# Altium footprint library STPMotorControl_1.PcbLib: 84 footprints (part 3 of 6)
Each footprint in its own frame and in the unit in brackets; x right, y up, seen from the top. Pads: shape width x height; smd on the part's side, far side on the other; paste and mask are expansions set on the pad; w line width, h text height; cw(c..) or ccw(c..) is an arc to the next point about the centre after c.
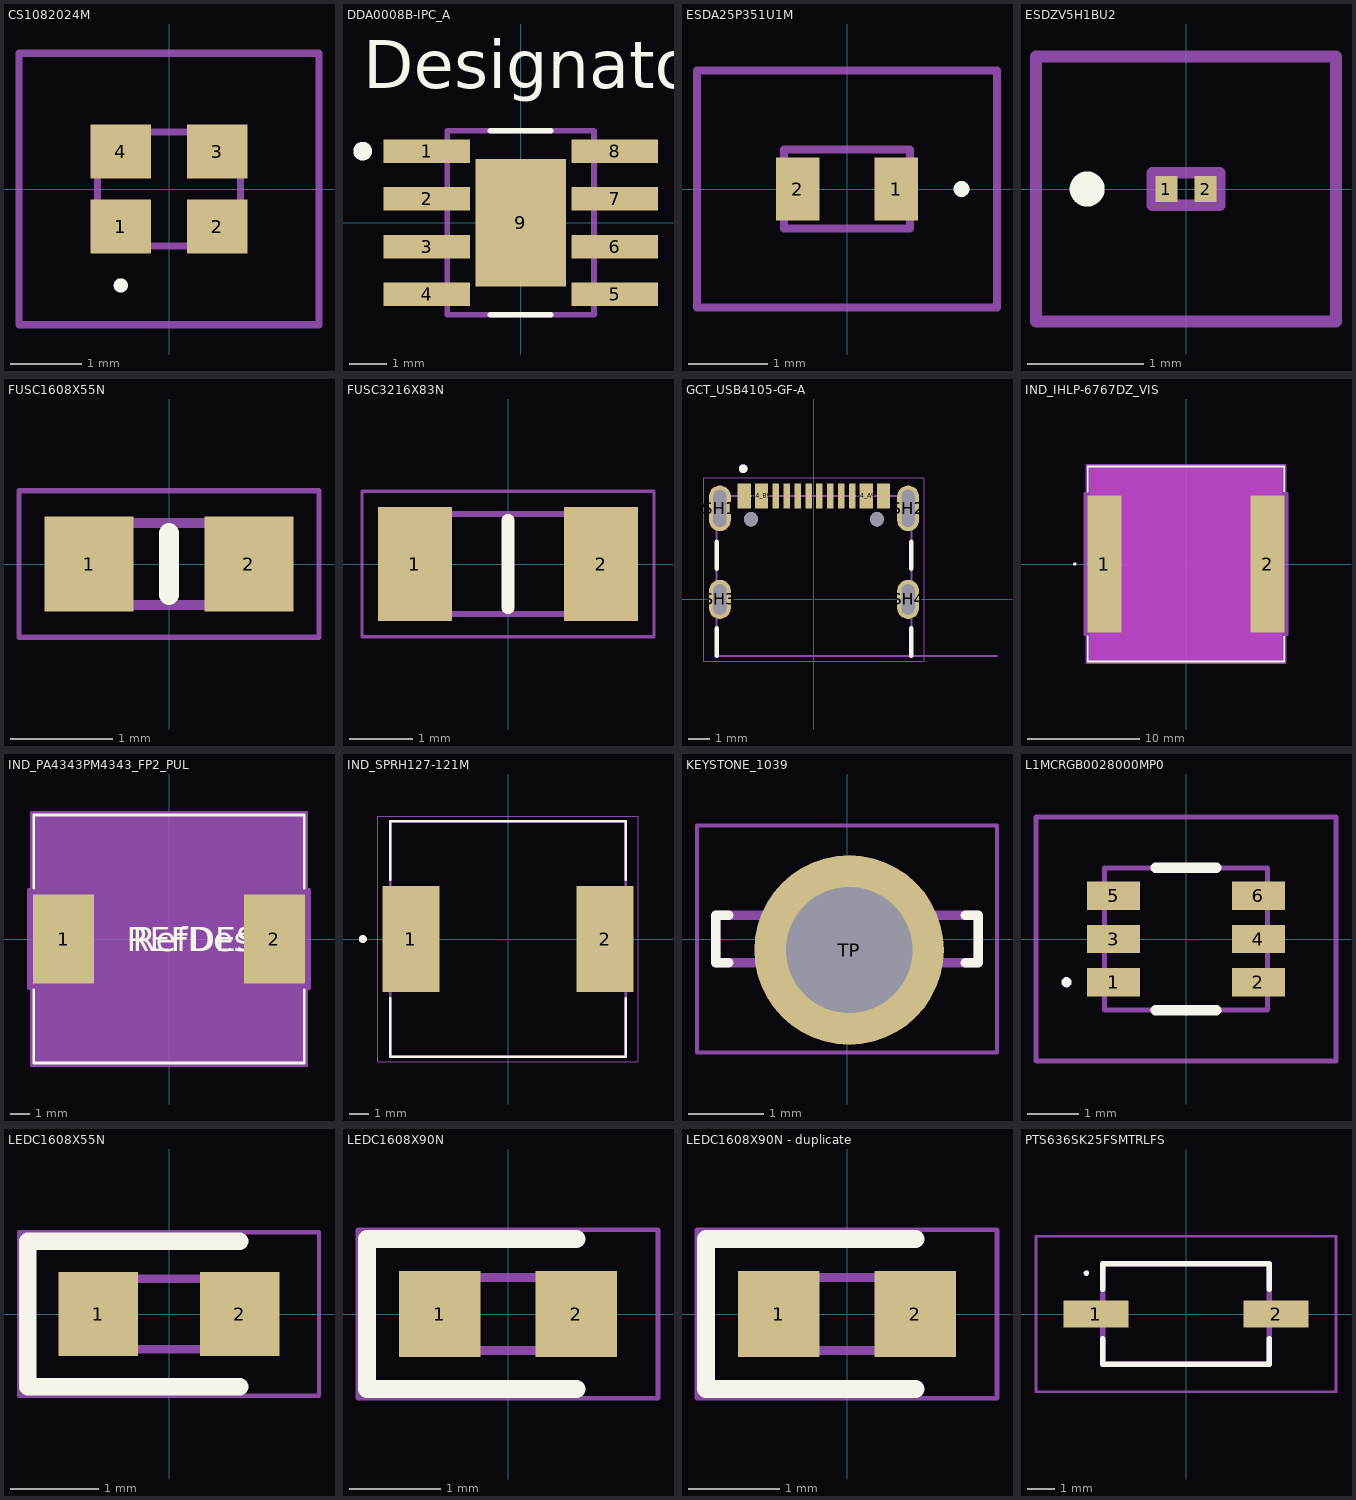
[diagram p2: the footprints below, top view; thin cyan lines are the x and y axes]

## CS1082024M [mm]
pads (4):
  rect 0.85x0.75 smd: 1(-0.675,-0.525) 2(0.675,-0.525) 3(0.675,0.525) 4(-0.675,0.525)
Top Overlay:
  lines w0.1: -0.675,-1.4 cw(c-0.675,-1.35) -0.675,-1.3 cw(c-0.675,-1.35) -0.675,-1.4
Mechanical 15:
  lines w0.1: -1,-0.8 -1,0.8 1,0.8 1,-0.8 -1,-0.8
Mechanical 20:
  lines w0.1: -2.1,-1.9 -2.1,1.9 2.1,1.9 2.1,-1.9 -2.1,-1.9
3D body "CS10820-24M.stp": height 0.6, standoff 0, extent -1.015,-0.818 1.035,0.832

## DDA0008B-IPC_A [mm]
pads (9):
  rect 2.298x0.622 smd paste+0 mask+0: 1(-2.504,1.905) 2(-2.504,0.635) 3(-2.504,-0.635) 4(-2.504,-1.905) 5(2.504,-1.905) 6(2.504,-0.635) 7(2.504,0.635) 8(2.504,1.905)
  rect 2.41x3.4 smd paste-1.687 mask+0: 9(0,0)
Top Overlay:
  circle w0.25: c-4.203,1.905 r0.125
  lines w0.15: -0.804,-2.45 0.804,-2.45 ; -0.804,2.45 0.804,2.45
  text "Designator857" at -4.191,3.581 h1.27
  text ".Designator" at -5.274,3.572 h1.27
Top Paste:
  region: -0.691,1.186 -0.691,-1.186 0.691,-1.186 0.691,1.186
Mechanical 13:
  lines w0.15: -1.95,-2.45 -1.95,2.45 1.95,2.45 1.95,-2.45 -1.95,-2.45
  text ".Designator" at -5.265,3.572 h1.27

## ESDA25P351U1M [mm]
pads (2):
  rect 0.55x0.8 smd: 1(0.625,0) 2(-0.625,0)
Top Overlay:
  lines w0.1: 1.4,0 ccw(c1.45,0) 1.5,0 ccw(c1.45,0) 1.4,0
Mechanical 13:
  lines w0.1: -0.8,-0.5 -0.8,0.5 0.8,0.5 0.8,-0.5 -0.8,-0.5
Mechanical 15:
  lines w0.1: -1.9,-1.5 1.9,-1.5 1.9,1.5 -1.9,1.5 -1.9,-1.5
3D body "ESDA25P35-1U1M.stp": height 0.57, standoff 0, extent -0.8,-0.5 0.8,0.5

## ESDZV5H1BU2 [mm]
pads (2):
  rect 0.187x0.225 smd: 1(-0.168,0) 2(0.168,0)
Top Overlay:
  lines w0.2: -0.9,0 ccw(c-0.85,0) -0.8,0 ; -0.9,0 cw(c-0.85,0) -0.8,0 ; -0.9,0 ccw(c-0.85,0) -0.8,0
Mechanical 15:
  lines w0.1: -0.29,-0.14 0.29,-0.14 0.29,0.14 -0.29,0.14 -0.29,-0.14
Mechanical 20:
  lines w0.1: -1.29,-1.14 1.29,-1.14 1.29,1.14 -1.29,1.14 -1.29,-1.14
3D body "ESDZV5H-1BU2.stp": height 0.37, standoff 0, extent -0.289,-0.139 0.291,0.141

## FUSC1608X55N [mm]
pads (2):
  rect 0.87x0.93 smd: 1(-0.78,0) 2(0.78,0)
Top Overlay:
  lines w0.2: 0,-0.3 0,0.3
Mechanical 15:
  lines w0.1: -0.8,-0.4 0.8,-0.4 0.8,0.4 -0.8,0.4 -0.8,-0.4
Mechanical 20:
  lines w0.05: -1.465,-0.715 1.465,-0.715 1.465,0.715 -1.465,0.715 -1.465,-0.715
3D body "SF-0603S080-2.stp": height 0.55, standoff 0, extent -0.79,-0.388 0.81,0.412

## FUSC3216X83N [mm]
pads (2):
  rect 1.17x1.8 smd: 1(-1.47,0) 2(1.47,0)
Top Overlay:
  lines w0.2: 0,-0.69 0,0.69
Mechanical 13:
  lines w0.1: -1.6,-0.79 -1.6,0.79 1.6,0.79 1.6,-0.79 -1.6,-0.79
Mechanical 15:
  lines w0.05: -2.305,-1.15 -2.305,1.15 2.305,1.15 2.305,-1.15 -2.305,-1.15
3D body "0685T1000-01.stp": height 0.83, standoff 0, extent -1.6,-0.79 1.6,0.79

## GCT_USB4105-GF-A [mm]
height 3.31
pads (18):
  rect 0.6x1.15 smd mask+0.05: A1_B12(-3.2,4.755) A4_B9(-2.4,4.755) B1_A12(3.2,4.755) B4_A9(2.4,4.755)
  rect 0.3x1.15 smd mask+0.05: A5(-1.25,4.755) A6(-0.25,4.755) A7(0.25,4.755) A8(1.25,4.755) B5(1.75,4.755) B6(0.75,4.755) B7(-0.75,4.755) B8(-1.75,4.755)
  oval 1x2.1 hole 0.6 slot 1.7 at 90 deg: SH1(-4.32,4.18) SH2(4.32,4.18)
  oval 1x1.8 hole 0.6 slot 1.4 at 90 deg: SH3(-4.32,0) SH4(4.32,0)
  round 0.65 hole 0.65 unplated: ""(-2.89,3.68) ""(2.89,3.68)
Top Overlay:
  circle w0.2: c-3.25,6 r0.1
  lines w0.2: -4.47,-2.6 -4.47,-1.32 ; -4.47,1.4 -4.47,2.65 ; 4.47,-2.6 4.47,-1.32 ; 4.47,1.4 4.47,2.65
Mechanical 13:
  circle w0.2: c-3.25,6 r0.1
  lines w0.1: 8.4,-2.6 4.47,-2.6 ; 4.47,-2.6 4.47,4.75 -4.47,4.75 -4.47,-2.6 4.47,-2.6
  text "PCB EDGE" at 5.4,-2.5 h0.41
Mechanical 15:
  lines w0.05: -5.07,-2.85 -5.07,5.58 5.07,5.58 5.07,-2.85 -5.07,-2.85

## IND_IHLP-6767DZ_VIS [mil]
pads (2):
  rect 119x480 smd paste+0 mask+0: 1(-286.5,0) 2(286.5,0)
Top Layer keep-out:
  region: -225,-242 -225,242 225,242 225,-242
  region: -338,242 -338,335.5 338,335.5 338,242
  region: -338,-335.5 -338,-242 338,-242 338,-335.5
Top Overlay:
  circle w6: c-390,0 r3
  lines w6: -345,-253.1 -345,-342.5 345,-342.5 345,-253.1 ; -345,253.1 -345,342.5 345,342.5 345,253.1
  text ".Designator" at -137.5,-25 h50
Keep-Out Layer:
  region: -225,-242 -225,242 225,242 225,-242
Mechanical 13:
  circle w1: c-320,0 r3
  lines w1: -340,-337.5 340,-337.5 340,337.5 -340,337.5 -340,-337.5
  text ".Designator" at -137.5,-25 h50
Mechanical 15:
  region: -350,-250 -356,-250 -356,250 -350,250 -350,347.5 350,347.5 350,250 356,250 356,-250 350,-250 350,-347.5 -350,-347.5
  lines w6: -356,-250 -356,250 -350,250 -350,347.5 350,347.5 350,250 356,250 356,-250 350,-250 350,-347.5 -350,-347.5 -350,-250 -356,-250
3D body "IND_IHLP-6767DZ_VIS.step": height 160, standoff 0, extent -340,-337.48 340,337.48

## IND_PA4343PM4343_FP2_PUL [mil]
pads (2):
  rect 126x185 smd paste+0 mask+0: 1(-218.5,0) 2(218.5,0)
Top Overlay:
  lines w6: -280.5,-105.6 -280.5,-257 280.5,-257 280.5,-105.6 ; -280.5,105.6 -280.5,257 280.5,257 280.5,105.6
  text "REFDES" at -87.5,-25 h50
  text "RefDes" at -75,-25 h50
Mechanical 13:
  lines w1: -275.5,-126 -149.5,-252 ; -275.5,126 -149.5,252 ; -275.5,-252 -275.5,252 275.5,252 275.5,-252 -275.5,-252
  text "RefDes2" at -87.5,-25 h50
Mechanical 15:
  region: 275.5,-252 -275.5,-252 -275.5,252 275.5,252
  region: -285.5,-102.5 -291.5,-102.5 -291.5,102.5 -285.5,102.5 -285.5,262 285.5,262 285.5,102.5 291.5,102.5 291.5,-102.5 285.5,-102.5 285.5,-262 -285.5,-262
  lines w6: -291.5,-102.5 -285.5,-102.5 -285.5,-262 285.5,-262 285.5,-102.5 291.5,-102.5 291.5,102.5 285.5,102.5 285.5,262 -285.5,262 -285.5,102.5 -291.5,102.5 -291.5,-102.5
3D body "IND_PA4343PM4343_FP2_PUL.step": height 255.98, standoff 0, extent -275.51,-252.01 275.51,252.01

## IND_SPRH127-121M [mm]
height 8.05
pads (2):
  rect 2.9x5.4 smd paste+0 mask+0.102: 1(-4.95,0) 2(4.95,0)
Top Overlay:
  circle w0.2: c-7.4,0 r0.1
  lines w0.127: -6,-3.02 -6,-6 6,-6 6,-3.02 ; -6,3.02 -6,6 6,6 6,3.02
Mechanical 13:
  circle w0.2: c-7.4,0 r0.1
  lines w0.127: -6,-6 6,-6 6,6 -6,6 -6,-6
Mechanical 15:
  lines w0.05: -6.65,-6.25 6.65,-6.25 6.65,6.25 -6.65,6.25 -6.65,-6.25
3D body "IND_PA4343PM4343_FP2_PUL.step": height 6.5, standoff 0, extent -7.121,-6.278 6.875,6.524

## KEYSTONE_1039 [mm]
height 5.94
pads (1):
  round 2.535 hole 1.69 mask+0.102: TP(0.028,-0.147)
Top Overlay:
  lines w0.127: -1.581,-0.315 -1.755,-0.315 -1.755,0.315 -1.581,0.315 ; 1.581,-0.315 1.755,-0.315 1.755,0.315 1.581,0.315
Mechanical 13:
  lines w0.127: -1.755,-0.315 -1.755,0.315 1.755,0.315 1.755,-0.315 -1.755,-0.315
Mechanical 15:
  lines w0.05: -2.005,-1.518 -2.005,1.518 2.005,1.518 2.005,-1.518 -2.005,-1.518
3D body "step_temp.STEP": height 6.96, standoff -3.05, extent -1.753,-0.422 1.753,0.213

## L1MCRGB0028000MP0 [mm]
pads (6):
  rect 1.05x0.56 smd: 1(-1.425,-0.85) 2(1.425,-0.85) 3(-1.425,0) 4(1.425,0) 5(-1.425,0.85) 6(1.425,0.85)
Top Overlay:
  lines w0.1: -2.4,-0.85 ccw(c-2.35,-0.85) -2.3,-0.85 ccw(c-2.35,-0.85) -2.4,-0.85
  lines w0.2: -0.6,-1.4 0.6,-1.4 ; -0.6,1.4 0.6,1.4
Mechanical 15:
  lines w0.1: -1.6,-1.4 1.6,-1.4 1.6,1.4 -1.6,1.4 -1.6,-1.4
Mechanical 20:
  lines w0.1: -2.95,-2.4 2.95,-2.4 2.95,2.4 -2.95,2.4 -2.95,-2.4
3D body "L1MC-RGB0028000MP0.stp": height 1.78, standoff -0.02, extent -1.75,-1.4 1.75,1.4

## LEDC1608X55N [mm]
pads (2):
  rect 0.9x0.95 smd: 1(-0.8,0) 2(0.8,0)
Top Overlay:
  lines w0.2: 0.8,-0.825 -1.6,-0.825 -1.6,0.825 0.8,0.825
Mechanical 13:
  lines w0.1: -0.8,0.133 -0.533,0.4 ; -0.8,-0.4 -0.8,0.4 0.8,0.4 0.8,-0.4 -0.8,-0.4
Mechanical 15:
  lines w0.05: -1.7,-0.925 -1.7,0.925 1.7,0.925 1.7,-0.925 -1.7,-0.925
3D body "LTST-C191KRKT.stp": height 0.55, standoff 0, extent -0.83,-0.4 0.77,0.4

## LEDC1608X90N [mm]
pads (2):
  rect 0.9x0.95 smd: 1(-0.75,0) 2(0.75,0)
Top Overlay:
  lines w0.2: 0.75,-0.825 -1.55,-0.825 -1.55,0.825 0.75,0.825
Mechanical 13:
  lines w0.1: -0.8,0.133 -0.533,0.4 ; -0.8,-0.4 0.8,-0.4 0.8,0.4 -0.8,0.4 -0.8,-0.4
Mechanical 15:
  lines w0.05: -1.65,-0.925 1.65,-0.925 1.65,0.925 -1.65,0.925 -1.65,-0.925
3D body "LTST-C190GKT.stp": height 0.8, standoff 0, extent -0.82,-0.4 0.78,0.4

## LEDC1608X90N - duplicate [mm]
pads (2):
  rect 0.9x0.95 smd: 1(-0.75,0) 2(0.75,0)
Top Overlay:
  lines w0.2: 0.75,-0.825 -1.55,-0.825 -1.55,0.825 0.75,0.825
Mechanical 13:
  lines w0.1: -0.8,0.133 -0.533,0.4 ; -0.8,-0.4 -0.8,0.4 0.8,0.4 0.8,-0.4 -0.8,-0.4
Mechanical 15:
  lines w0.05: -1.65,-0.925 -1.65,0.925 1.65,0.925 1.65,-0.925 -1.65,-0.925
3D body "LTST-C190GKT.stp": height 0.8, standoff 0, extent -0.82,-0.4 0.78,0.4

## PTS636SK25FSMTRLFS [mm]
pads (2):
  rect 2.4x1 smd: 1(-3.3,0) 2(3.3,0)
Top Overlay:
  lines w0.1: -3.7,1.5 cw(c-3.65,1.5) -3.6,1.5 cw(c-3.65,1.5) -3.7,1.5
  lines w0.2: -3.05,-0.9 -3.05,-1.85 3.05,-1.85 3.05,-0.9 ; -3.05,0.9 -3.05,1.85 3.05,1.85 3.05,0.9
Mechanical 15:
  lines w0.2: -3.05,-1.85 3.05,-1.85 3.05,1.85 -3.05,1.85 -3.05,-1.85
Mechanical 20:
  lines w0.1: -5.5,-2.85 5.5,-2.85 5.5,2.85 -5.5,2.85 -5.5,-2.85